# Altium footprint library Amin-Library.PcbLib: 601 footprints (part 17 of 38)
Each footprint in its own frame and in the unit in brackets; x right, y up, seen from the top. Pads: shape width x height; smd on the part's side, far side on the other; paste and mask are expansions set on the pad; w line width, h text height; cw(c..) or ccw(c..) is an arc to the next point about the centre after c.
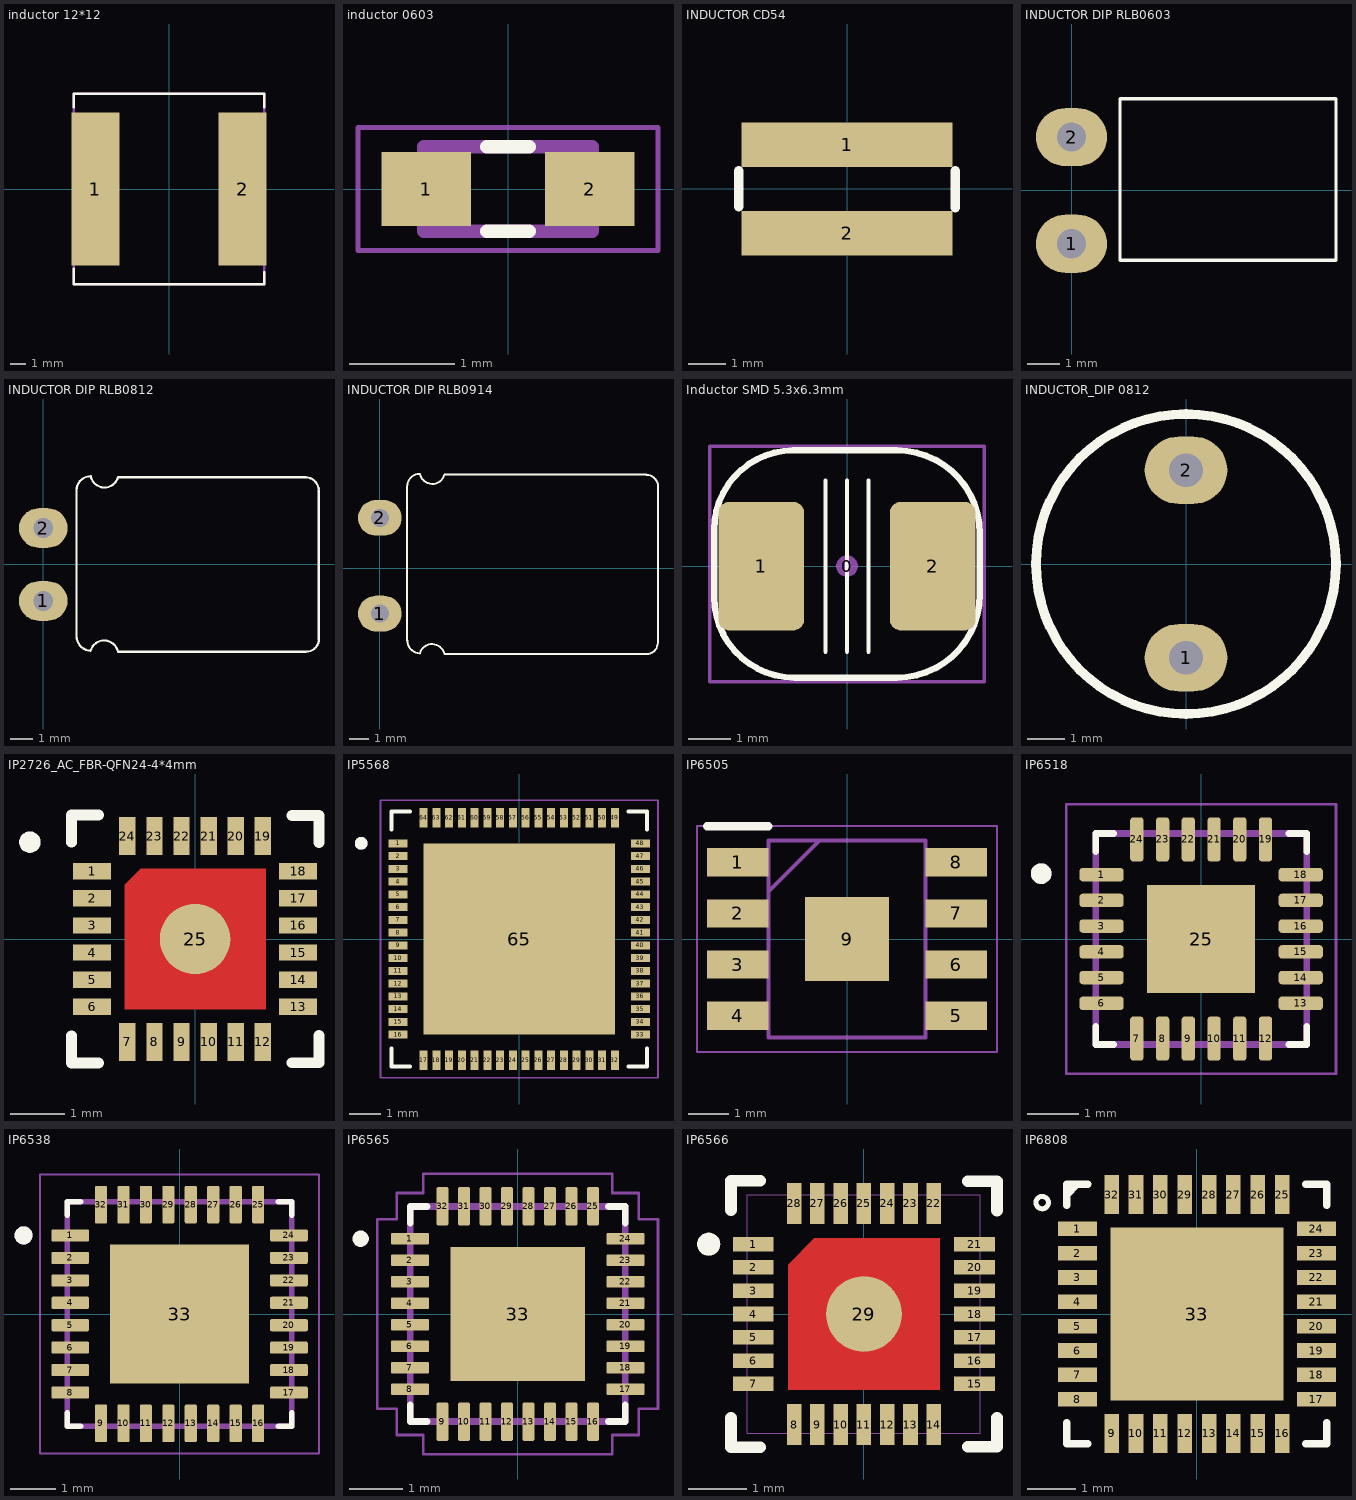
[diagram p16: the footprints below, top view; thin cyan lines are the x and y axes]

## inductor 12*12 [mil]
height 393.7
pads (2):
  rect 124x393.7 smd paste-99999: 1(-190,0) 2(190,0)
Top Overlay:
  lines w6: -246,-205 -246,-246 246,-246 246,-215 ; -246,210 -246,246 246,246 246,210
Top Paste:
  rectangle: 140,150 240,175
  rectangle: 140,109.38 240,134.38
  rectangle: 140,68.75 240,93.75
  rectangle: 140,28.12 240,53.12
  rectangle: 140,-12.5 240,12.5
  rectangle: 140,-53.12 240,-28.12
  rectangle: 140,-93.75 240,-68.75
  rectangle: 140,-134.38 240,-109.38
  rectangle: 140,-175 240,-150
  rectangle: -240,150 -140,175
  rectangle: -240,109.38 -140,134.38
  rectangle: -240,68.75 -140,93.75
  rectangle: -240,28.12 -140,53.12
  rectangle: -240,-12.5 -140,12.5
  rectangle: -240,-53.12 -140,-28.12
  rectangle: -240,-93.75 -140,-68.75
  rectangle: -240,-134.38 -140,-109.38
  rectangle: -240,-175 -140,-150
Mechanical 4:
  lines w6: -246,-246 246,-246 ; -246,-246 -246,246 ; -246,-246 246,-246 ; -246,-246 -246,246 ; -246,246 246,246 ; -246,246 246,246 ; 246,-246 246,246 ; 246,-246 246,246
3D body "User Library-CDRH127-2.step": height 315.46, standoff 0.5, extent -236.22,-236.22 236.22,236.22

## inductor 0603 [mm]
pads (2):
  rect 0.85x0.7 smd: 1(-0.775,0) 2(0.775,0)
Top Overlay:
  lines w0.127: -0.2,-0.4 0.2,-0.4 ; -0.2,0.4 0.2,0.4
Mechanical 4:
  region: -0.8,0.4 -0.4,0.4 -0.4,-0.4 -0.8,-0.4
  region: 0.4,0.4 0.8,0.4 0.8,-0.4 0.4,-0.4
  region: -0.8,0.4 -0.4,0.4 -0.4,-0.4 -0.8,-0.4
  region: 0.4,0.4 0.8,0.4 0.8,-0.4 0.4,-0.4
  lines w0.127: -0.8,-0.4 0.8,-0.4 ; -0.8,-0.4 -0.8,0.4 ; -0.8,-0.4 0.8,-0.4 ; -0.8,-0.4 -0.8,0.4 ; -0.8,0.4 0.8,0.4 ; -0.8,0.4 0.8,0.4 ; 0.8,-0.4 0.8,0.4 ; 0.8,-0.4 0.8,0.4
Mechanical 16:
  lines w0.051: -1.423,-0.583 1.423,-0.583 1.423,0.583 -1.423,0.583 -1.423,-0.583
3D body "User Library-FB_1608.STEP": height 0.8, standoff 0, extent -0.8,-0.4 0.8,0.4

## INDUCTOR CD54 [mm]
pads (2):
  rect 5.7x1.2 smd: 1(0,1.194) 2(0,-1.206)
Top Overlay:
  lines w0.254: -2.921,-0.483 -2.921,0.483 ; 2.921,-0.508 2.921,0.483

## INDUCTOR DIP RLB0603 [mm] "INDUCTOR DIP  RLB0603"
pads (2):
  oval 2.2x1.8 hole 0.9: 1(0,-1.651) 2(0,1.651)
Top Overlay:
  lines w0.1: 1.5,-2.159 8.189,-2.159 8.189,2.841 1.5,2.841 1.5,-2.159
3D body "RLB0608_horizontal.stp": height 5.1, standoff -3, extent -0.061,-2.159 8.189,2.841

## INDUCTOR DIP RLB0812 [mm] "INDUCTOR DIP  12*8 RLB0812"
pads (2):
  oval 2.2x1.8 hole 0.9: 1(0,-1.651) 2(0,1.651)
Top Overlay:
  lines w0.1: 1.498,3.36 cw(c2.145,3.347) 2.145,3.995 ccw(c2.768,4.119) 3.38,3.95 11.888,3.95 ; 1.5,-3.256 1.5,3.36 ; 1.505,-3.255 ccw(c2.153,-3.255) 2.14,-3.902 ; 2.142,-3.905 cw(c2.754,-4.075) 3.377,-3.95 11.896,-3.95 ccw(c11.896,-3.367) 12.479,-3.378 ; 11.884,3.944 cw(c11.872,3.344) 12.472,3.344 ; 12.472,-3.384 12.472,3.352
3D body "RLB0812_horizontal.stp": height 6.8, standoff -3, extent -0.337,-3.223 11.938,3.477

## INDUCTOR DIP RLB0914 [mm] "INDUCTOR DIP RLB0914"
pads (2):
  oval 2.2x1.8 hole 0.9: 1(0,-2.286) 2(0,2.54)
Top Overlay:
  lines w0.1: 1.371,-3.638 1.371,4.122 cw(c2.018,4.109) 2.018,4.757 ccw(c2.641,4.881) 3.253,4.712 13.428,4.712 ; 1.384,-3.638 ccw(c2.031,-3.638) 2.018,-4.286 cw(c2.63,-4.455) 3.253,-4.33 13.428,-4.331 ccw(c13.428,-3.748) 14.012,-3.753 ; 13.428,4.709 cw(c13.417,4.109) 14.017,4.109 14.017,-3.753
3D body "RLB0914_horizontal.stp": height 8.8, standoff -3, extent -0.407,-4.191 13.869,4.509

## Inductor SMD 5.3x6.3mm [mm] "Inductor 4.7µH SMD 5.3*6.3mm"
height 2.54
pads (3):
  round 0.508 on Mech15: 0(0,0)
  rrect25% 2x3 smd: 1(-2,0) 2(2,0)
Top Overlay:
  lines w0.1: -0.5,-2 -0.5,2 ; 0,-2 0,2 ; 0.5,-2 0.5,2
  lines w0.15: -3.1,-0.725 ccw(c-1.225,-0.725) -1.225,-2.6 1.165,-2.6 ccw(c1.165,-0.665) 3.1,-0.665 3.1,0.765 ccw(c1.165,0.765) 1.165,2.7 -1.252,2.7 ccw(c-1.252,0.852) -3.1,0.852 -3.1,-0.725
Mechanical 15:
  lines w0.076: -3.2,-2.7 -3.2,2.8 3.2,2.8 3.2,-2.7 -3.2,-2.7
3D body "smd self 4.7uH.stp": height 4.5, standoff 0, extent -2.899,-2.6 2.889,2.6

## INDUCTOR_DIP 0812 [mm] "INDUCTOR DIP  8*12"
pads (2):
  oval 2.2x1.8 hole 0.9: 1(0,-2.5) 2(0,2.5)
Top Overlay:
  circle w0.254: c0,0 r4
3D body "Inductor.STEP": height 13.5, standoff -4, extent -4.988,-5 4.988,5

## IP2726_AC_FBR-QFN24-4*4mm [mm]
pads (26):
  rect 0.7x0.3 smd mask+0.03: 1(-1.9,1.25) 2(-1.9,0.75) 3(-1.9,0.25) 4(-1.9,-0.25) 5(-1.9,-0.75) 6(-1.9,-1.25) 13(1.9,-1.25) 14(1.9,-0.75) 15(1.9,-0.25) 16(1.9,0.25) 17(1.9,0.75) 18(1.9,1.25)
  rect 0.3x0.7 smd mask+0.03: 7(-1.25,-1.9) 8(-0.75,-1.9) 9(-0.25,-1.9) 10(0.25,-1.9) 11(0.75,-1.9) 12(1.25,-1.9) 19(1.25,1.9) 20(0.75,1.9) 21(0.25,1.9) 22(-0.25,1.9) 23(-0.75,1.9) 24(-1.25,1.9)
  round 1.3 smd paste-2: 25(0,0)
  round 0.4 on Top Overlay: ""(-3.048,1.786)
Top Layer:
  region: -1,1.3 -1.3,1 -1.3,-1.3 1.3,-1.3 1.3,1.3
Top Overlay:
  lines w0.2: -2.282,-1.786 -2.282,-2.286 -1.782,-2.286 ; -2.282,1.786 -2.282,2.286 -1.782,2.286 ; 1.786,-2.282 2.286,-2.282 2.286,-1.782 ; 1.786,2.278 2.286,2.278 2.286,1.778
Top Paste:
  rectangle: 0.225,-0.95 0.975,-0.25
  rectangle: 0.225,0.225 0.975,0.975
  rectangle: -0.975,0.25 -0.225,0.95
  rectangle: -0.975,-0.95 -0.225,-0.25
3D body: height 0.75, standoff 0, extent -2,-2.05 2,2.05

## IP5568 [mm]
pads (65):
  rect 0.6x0.25 smd: 1(-3.8,3) 2(-3.8,2.6) 3(-3.8,2.2) 4(-3.8,1.8) 5(-3.8,1.4) 6(-3.8,1) 7(-3.8,0.6) 8(-3.8,0.2) 9(-3.8,-0.2) 10(-3.8,-0.6) 11(-3.8,-1) 12(-3.8,-1.4) 13(-3.8,-1.8) 14(-3.8,-2.2) 15(-3.8,-2.6) 16(-3.8,-3) 33(3.8,-3) 34(3.8,-2.6) 35(3.8,-2.2) 36(3.8,-1.8) 37(3.8,-1.4) 38(3.8,-1) 39(3.8,-0.6) 40(3.8,-0.2) 41(3.8,0.2) 42(3.8,0.6) 43(3.8,1) 44(3.8,1.4) 45(3.8,1.8) 46(3.8,2.2) 47(3.8,2.6) 48(3.8,3)
  rect 0.25x0.6 smd: 17(-3,-3.8) 18(-2.6,-3.8) 19(-2.2,-3.8) 20(-1.8,-3.8) 21(-1.4,-3.8) 22(-1,-3.8) 23(-0.6,-3.8) 24(-0.2,-3.8) 25(0.2,-3.8) 26(0.6,-3.8) 27(1,-3.8) 28(1.4,-3.8) 29(1.8,-3.8) 30(2.2,-3.8) 31(2.6,-3.8) 32(3,-3.8) 49(3,3.8) 50(2.6,3.8) 51(2.2,3.8) 52(1.8,3.8) 53(1.4,3.8) 54(1,3.8) 55(0.6,3.8) 56(0.2,3.8) 57(-0.2,3.8) 58(-0.6,3.8) 59(-1,3.8) 60(-1.4,3.8) 61(-1.8,3.8) 62(-2.2,3.8) 63(-2.6,3.8) 64(-3,3.8)
  rect 6x6 smd paste-2.535: 65(0,0)
Top Overlay:
  circle w0.2: c-4.955,3 r0.1
  lines w0.127: -4,-3.43 -4,-4 -3.43,-4 ; -4,3.43 -4,4 -3.43,4 ; 3.43,-4 4,-4 4,-3.43 ; 3.43,4 4,4 4,3.43
Top Paste:
  region: 0.465,0.665 -0.465,0.665 -0.465,1.595 0.465,1.595
  region: 0.465,1.795 -0.465,1.795 -0.465,2.725 0.465,2.725
  region: -0.665,1.795 -1.595,1.795 -1.595,2.725 -0.665,2.725
  region: -1.795,1.795 -2.725,1.795 -2.725,2.725 -1.795,2.725
  region: 1.595,1.795 0.665,1.795 0.665,2.725 1.595,2.725
  region: 2.725,1.795 1.795,1.795 1.795,2.725 2.725,2.725
  region: 2.725,0.665 1.795,0.665 1.795,1.595 2.725,1.595
  region: 1.595,0.665 0.665,0.665 0.665,1.595 1.595,1.595
  region: -0.665,0.665 -1.595,0.665 -1.595,1.595 -0.665,1.595
  region: -1.795,0.665 -2.725,0.665 -2.725,1.595 -1.795,1.595
  region: -1.795,-0.465 -2.725,-0.465 -2.725,0.465 -1.795,0.465
  region: -0.665,-0.465 -1.595,-0.465 -1.595,0.465 -0.665,0.465
  region: 1.595,-0.465 0.665,-0.465 0.665,0.465 1.595,0.465
  region: 2.725,-0.465 1.795,-0.465 1.795,0.465 2.725,0.465
  region: 0.465,-2.725 -0.465,-2.725 -0.465,-1.795 0.465,-1.795
  region: 0.465,-1.595 -0.465,-1.595 -0.465,-0.665 0.465,-0.665
  region: -0.665,-1.595 -1.595,-1.595 -1.595,-0.665 -0.665,-0.665
  region: -1.795,-1.595 -2.725,-1.595 -2.725,-0.665 -1.795,-0.665
  region: 1.595,-1.595 0.665,-1.595 0.665,-0.665 1.595,-0.665
  region: 2.725,-1.595 1.795,-1.595 1.795,-0.665 2.725,-0.665
  region: 2.725,-2.725 1.795,-2.725 1.795,-1.795 2.725,-1.795
  region: 1.595,-2.725 0.665,-2.725 0.665,-1.795 1.595,-1.795
  region: -0.665,-2.725 -1.595,-2.725 -1.595,-1.795 -0.665,-1.795
  region: -1.795,-2.725 -2.725,-2.725 -2.725,-1.795 -1.795,-1.795
Top Courtyard:
  lines w0.05: -4.35,-4.35 4.35,-4.35 4.35,4.35 -4.35,4.35 -4.35,-4.35
Mechanical 13:
  circle w0.2: c-4.955,3 r0.1
Mechanical 15:
  lines w0.05: -4.35,-4.35 4.35,-4.35 4.35,4.35 -4.35,4.35 -4.35,-4.35
3D body "step_temp.STEP": height 0.9, standoff 0, extent -4,-4 4,4

## IP6505 [mm]
pads (9):
  rect 1.525x0.7 smd: 1(-2.712,1.905) 2(-2.712,0.635) 3(-2.712,-0.635) 4(-2.712,-1.905) 5(2.712,-1.905) 6(2.712,-0.635) 7(2.712,0.635) 8(2.712,1.905)
  rect 2.09x2.09 smd: 9(0,0)
Top Overlay:
  lines w0.2: -3.475,2.8 -1.95,2.8
Mechanical 3:
  lines w0.05: -3.725,-2.8 3.725,-2.8 3.725,2.8 -3.725,2.8 -3.725,-2.8
  lines w0.1: -1.95,1.18 -0.68,2.45 ; -1.95,-2.45 1.95,-2.45 1.95,2.45 -1.95,2.45 -1.95,-2.45
3D body "IP6505.stp": height 1.65, standoff 0, extent -3,-2.45 3,2.45

## IP6518 [mm] "DC DC 45W FAST CHAREGR TYPE C"
pads (25):
  rrect50% 0.86x0.26 smd: 1(-1.935,1.25) 2(-1.935,0.75) 3(-1.935,0.25) 4(-1.935,-0.25) 5(-1.935,-0.75) 6(-1.935,-1.25) 13(1.935,-1.25) 14(1.935,-0.75) 15(1.935,-0.25) 16(1.935,0.25) 17(1.935,0.75) 18(1.935,1.25)
  rrect50% 0.26x0.86 smd: 7(-1.25,-1.935) 8(-0.75,-1.935) 9(-0.25,-1.935) 10(0.25,-1.935) 11(0.75,-1.935) 12(1.25,-1.935) 19(1.25,1.935) 20(0.75,1.935) 21(0.25,1.935) 22(-0.25,1.935) 23(-0.75,1.935) 24(-1.25,1.935)
  rect 2.1x2.1 smd paste-2: 25(0,0)
Top Overlay:
  circle w0.2: c-3.11,1.27 r0.1
  lines w0.127: -2.05,-1.7 -2.05,-2.05 -1.7,-2.05 ; -2.05,1.7 -2.05,2.05 -1.7,2.05 ; 1.7,-2.05 2.05,-2.05 2.05,-1.7 ; 1.7,2.05 2.05,2.05 2.05,1.7
Top Paste:
  region: -0.13,0.13 -0.79,0.13 -0.79,0.79 -0.13,0.79
  region: 0.79,0.13 0.13,0.13 0.13,0.79 0.79,0.79
  region: -0.13,-0.79 -0.79,-0.79 -0.79,-0.13 -0.13,-0.13
  region: 0.79,-0.79 0.13,-0.79 0.13,-0.13 0.79,-0.13
Mechanical 13:
  circle w0.2: c-3.11,1.27 r0.1
  lines w0.127: -2.05,-2.05 -2.05,2.05 2.05,2.05 2.05,-2.05 -2.05,-2.05
Mechanical 15:
  lines w0.05: -2.62,-2.62 -2.62,2.62 2.62,2.62 2.62,-2.62 -2.62,-2.62
3D body "User Library-QFN 24 4x4.step": height 0.91, standoff 0.01, extent -2.002,-2.002 2.002,2.002

## IP6538 [mm] "15w Wirless charger ic"
pads (33):
  rrect25% 0.84x0.27 smd mask-2539.97: 1(-2.435,1.75) 2(-2.435,1.25) 3(-2.435,0.75) 4(-2.435,0.25) 5(-2.435,-0.25) 6(-2.435,-0.75) 7(-2.435,-1.25) 8(-2.435,-1.75) 17(2.435,-1.75) 18(2.435,-1.25) 19(2.435,-0.75) 20(2.435,-0.25) 21(2.435,0.25) 22(2.435,0.75) 23(2.435,1.25) 24(2.435,1.75)
  rrect25% 0.27x0.84 smd mask-2539.97: 9(-1.75,-2.435) 10(-1.25,-2.435) 11(-0.75,-2.435) 12(-0.25,-2.435) 13(0.25,-2.435) 14(0.75,-2.435) 15(1.25,-2.435) 16(1.75,-2.435) 25(1.75,2.435) 26(1.25,2.435) 27(0.75,2.435) 28(0.25,2.435) 29(-0.25,2.435) 30(-0.75,2.435) 31(-1.25,2.435) 32(-1.75,2.435)
  rect 3.1x3.1 smd paste-3: 33(0,0)
Top Overlay:
  circle w0.2: c-3.475,1.75 r0.1
  lines w0.127: -2.5,-2.205 -2.5,-2.5 -2.205,-2.5 ; -2.5,2.205 -2.5,2.5 -2.205,2.5 ; 2.205,-2.5 2.5,-2.5 2.5,-2.205 ; 2.205,2.5 2.5,2.5 2.5,2.205
Top Paste:
  region: 1.24,-1.25 0.25,-1.25 0.25,-0.27 1.24,-0.27
  region: -0.26,-1.25 -1.25,-1.25 -1.25,-0.27 -0.26,-0.27
  region: -0.26,0.26 -1.25,0.26 -1.25,1.24 -0.26,1.24
  region: 1.24,0.26 0.25,0.26 0.25,1.24 1.24,1.24
Top Solder:
  region: 1.985,1.55 1.985,1.95 2.885,1.95 2.885,1.55
  region: 1.985,1.05 1.985,1.45 2.885,1.45 2.885,1.05
  region: 1.985,0.55 1.985,0.95 2.885,0.95 2.885,0.55
  region: 1.985,0.05 1.985,0.45 2.885,0.45 2.885,0.05
  region: 1.985,-0.45 1.985,-0.05 2.885,-0.05 2.885,-0.45
  region: 1.985,-0.95 1.985,-0.55 2.885,-0.55 2.885,-0.95
  region: 1.985,-1.45 1.985,-1.05 2.885,-1.05 2.885,-1.45
  region: 1.985,-1.95 1.985,-1.55 2.885,-1.55 2.885,-1.95
  region: -2.885,-1.95 -2.885,-1.55 -1.985,-1.55 -1.985,-1.95
  region: -2.885,-1.45 -2.885,-1.05 -1.985,-1.05 -1.985,-1.45
  region: -2.885,-0.95 -2.885,-0.55 -1.985,-0.55 -1.985,-0.95
  region: -2.885,-0.45 -2.885,-0.05 -1.985,-0.05 -1.985,-0.45
  region: -2.885,0.05 -2.885,0.45 -1.985,0.45 -1.985,0.05
  region: -2.885,0.55 -2.885,0.95 -1.985,0.95 -1.985,0.55
  region: -2.885,1.05 -2.885,1.45 -1.985,1.45 -1.985,1.05
  region: -2.885,1.55 -2.885,1.95 -1.985,1.95 -1.985,1.55
  region: -1.95,1.985 -1.95,2.885 -1.55,2.885 -1.55,1.985
  region: -1.45,1.985 -1.45,2.885 -1.05,2.885 -1.05,1.985
  region: -0.95,1.985 -0.95,2.885 -0.55,2.885 -0.55,1.985
  region: -0.45,1.985 -0.45,2.885 -0.05,2.885 -0.05,1.985
  region: 0.05,1.985 0.05,2.885 0.45,2.885 0.45,1.985
  region: 0.55,1.985 0.55,2.885 0.95,2.885 0.95,1.985
  region: 1.05,1.985 1.05,2.885 1.45,2.885 1.45,1.985
  region: 1.55,1.985 1.55,2.885 1.95,2.885 1.95,1.985
  region: 1.55,-2.885 1.55,-1.985 1.95,-1.985 1.95,-2.885
  region: 1.05,-2.885 1.05,-1.985 1.45,-1.985 1.45,-2.885
  region: 0.55,-2.885 0.55,-1.985 0.95,-1.985 0.95,-2.885
  region: 0.05,-2.885 0.05,-1.985 0.45,-1.985 0.45,-2.885
  region: -0.45,-2.885 -0.45,-1.985 -0.05,-1.985 -0.05,-2.885
  region: -0.95,-2.885 -0.95,-1.985 -0.55,-1.985 -0.55,-2.885
  region: -1.45,-2.885 -1.45,-1.985 -1.05,-1.985 -1.05,-2.885
  region: -1.95,-2.885 -1.95,-1.985 -1.55,-1.985 -1.55,-2.885
Top Courtyard:
  lines w0.1: 2.5,-2.509 2.5,2.5 2.49,2.51 -2.49,2.51 -2.5,2.5 -2.5,-2.5 -2.49,-2.51 2.5,-2.51 ; 2.5,-2.509 2.5,-2.51
Mechanical 13:
  circle w0.2: c-3.475,1.75 r0.1
  lines w0.127: -2.5,-2.5 -2.5,2.5 2.5,2.5 2.5,-2.5 -2.5,-2.5
Mechanical 15:
  lines w0.05: -3.105,-3.105 -3.105,3.105 3.105,3.105 3.105,-3.105 -3.105,-3.105
3D body "User Library-qfn32-5x5.step": height 0.8, standoff 0, extent -2.52,-2.51 2.5,2.51

## IP6565 [mm] "QFN32 4*4"
height 4.32
pads (33):
  rrect25% 0.71x0.22 smd mask-2539.97: 1(-2.005,1.4) 2(-2.005,1) 3(-2.005,0.6) 4(-2.005,0.2) 5(-2.005,-0.2) 6(-2.005,-0.6) 7(-2.005,-1) 8(-2.005,-1.4) 17(2.005,-1.4) 18(2.005,-1) 19(2.005,-0.6) 20(2.005,-0.2) 21(2.005,0.2) 22(2.005,0.6) 23(2.005,1) 24(2.005,1.4)
  rrect25% 0.22x0.71 smd mask-2539.97: 9(-1.4,-2.005) 10(-1,-2.005) 11(-0.6,-2.005) 12(-0.2,-2.005) 13(0.2,-2.005) 14(0.6,-2.005) 15(1,-2.005) 16(1.4,-2.005) 25(1.4,2.005) 26(1,2.005) 27(0.6,2.005) 28(0.2,2.005) 29(-0.2,2.005) 30(-0.6,2.005) 31(-1,2.005) 32(-1.4,2.005)
  rect 2.5x2.5 smd paste-2: 33(0,0)
Top Overlay:
  circle w0.2: c-2.921,1.4 r0.05
  lines w0.127: -2,-1.69 -2,-2 -1.69,-2 ; -2,1.69 -2,2 -1.69,2 ; 1.69,-2 2,-2 2,-1.69 ; 1.69,2 2,2 2,1.69
Top Paste:
  rectangle: 0.7,0.7 1.1,1.1
  rectangle: 0.1,0.7 0.5,1.1
  rectangle: -0.5,0.7 -0.1,1.1
  rectangle: -1.1,0.7 -0.7,1.1
  rectangle: 0.7,0.1 1.1,0.5
  rectangle: 0.1,0.1 0.5,0.5
  rectangle: -0.5,0.1 -0.1,0.5
  rectangle: -1.1,0.1 -0.7,0.5
  rectangle: 0.7,-0.5 1.1,-0.1
  rectangle: 0.1,-0.5 0.5,-0.1
  rectangle: -0.5,-0.5 -0.1,-0.1
  rectangle: -1.1,-0.5 -0.7,-0.1
  rectangle: 0.7,-1.1 1.1,-0.7
  rectangle: 0.1,-1.1 0.5,-0.7
  rectangle: -0.5,-1.1 -0.1,-0.7
  rectangle: -1.1,-1.1 -0.7,-0.7
Top Solder:
  region: 1.25,1.605 1.25,2.405 1.55,2.405 1.55,1.605
  region: 0.85,1.605 0.85,2.405 1.15,2.405 1.15,1.605
  region: 0.45,1.605 0.45,2.405 0.75,2.405 0.75,1.605
  region: 0.05,1.605 0.05,2.405 0.35,2.405 0.35,1.605
  region: -0.35,1.605 -0.35,2.405 -0.05,2.405 -0.05,1.605
  region: -0.75,1.605 -0.75,2.405 -0.45,2.405 -0.45,1.605
  region: -1.15,1.605 -1.15,2.405 -0.85,2.405 -0.85,1.605
  region: -1.55,1.605 -1.55,2.405 -1.25,2.405 -1.25,1.605
  region: -2.405,1.25 -2.405,1.55 -1.605,1.55 -1.605,1.25
  region: -2.405,0.85 -2.405,1.15 -1.605,1.15 -1.605,0.85
  region: -2.405,0.45 -2.405,0.75 -1.605,0.75 -1.605,0.45
  region: -2.405,0.05 -2.405,0.35 -1.605,0.35 -1.605,0.05
  region: -2.405,-0.35 -2.405,-0.05 -1.605,-0.05 -1.605,-0.35
  region: -2.405,-0.75 -2.405,-0.45 -1.605,-0.45 -1.605,-0.75
  region: -2.405,-1.15 -2.405,-0.85 -1.605,-0.85 -1.605,-1.15
  region: -2.405,-1.55 -2.405,-1.25 -1.605,-1.25 -1.605,-1.55
  region: -1.55,-2.405 -1.55,-1.605 -1.25,-1.605 -1.25,-2.405
  region: -1.15,-2.405 -1.15,-1.605 -0.85,-1.605 -0.85,-2.405
  region: -0.75,-2.405 -0.75,-1.605 -0.45,-1.605 -0.45,-2.405
  region: -0.35,-2.405 -0.35,-1.605 -0.05,-1.605 -0.05,-2.405
  region: 0.05,-2.405 0.05,-1.605 0.35,-1.605 0.35,-2.405
  region: 0.45,-2.405 0.45,-1.605 0.75,-1.605 0.75,-2.405
  region: 0.85,-2.405 0.85,-1.605 1.15,-1.605 1.15,-2.405
  region: 1.25,-2.405 1.25,-1.605 1.55,-1.605 1.55,-2.405
  region: 1.605,-1.15 1.605,-0.85 2.405,-0.85 2.405,-1.15
  region: 1.605,-1.55 1.605,-1.25 2.405,-1.25 2.405,-1.55
  region: 1.605,-0.75 1.605,-0.45 2.405,-0.45 2.405,-0.75
  region: 1.605,-0.35 1.605,-0.05 2.405,-0.05 2.405,-0.35
  region: 1.605,0.05 1.605,0.35 2.405,0.35 2.405,0.05
  region: 1.605,0.45 1.605,0.75 2.405,0.75 2.405,0.45
  region: 1.605,0.85 1.605,1.15 2.405,1.15 2.405,0.85
  region: 1.605,1.25 1.605,1.55 2.405,1.55 2.405,1.25
Top Courtyard:
  lines w0.02: -2,-2 2,-2 2,2 -2,2 -2,-2
Mechanical 13:
  lines w0.127: -2,-2 -2,2 2,2 2,-2 -2,-2
Mechanical 15:
  lines w0.05: -2.61,-1.76 -2.61,1.76 -2.25,1.76 -2.25,2.25 -1.76,2.25 -1.76,2.61 1.76,2.61 1.76,2.25 2.25,2.25 2.25,1.76 2.61,1.76 2.61,-1.76 2.25,-1.76 2.25,-2.25 1.76,-2.25 1.76,-2.61 -1.76,-2.61 -1.76,-2.25 -2.25,-2.25 -2.25,-1.76 -2.61,-1.76
3D body "step_temp.STEP": height 0.55, standoff 0, extent -2,-2 2,2

## IP6566 [mm]
height 4.32
pads (30):
  rect 0.7x0.25 smd mask+0.03: 1(-1.9,1.2) 2(-1.9,0.8) 3(-1.9,0.4) 4(-1.9,0) 5(-1.9,-0.4) 6(-1.9,-0.8) 7(-1.9,-1.2) 15(1.9,-1.2) 16(1.9,-0.8) 17(1.9,-0.4) 18(1.9,0) 19(1.9,0.4) 20(1.9,0.8) 21(1.9,1.2)
  rect 0.25x0.7 smd mask+0.03: 8(-1.2,-1.9) 9(-0.8,-1.9) 10(-0.4,-1.9) 11(0,-1.9) 12(0.4,-1.9) 13(0.8,-1.9) 14(1.2,-1.9) 22(1.2,1.9) 23(0.8,1.9) 24(0.4,1.9) 25(0,1.9) 26(-0.4,1.9) 27(-0.8,1.9) 28(-1.2,1.9)
  round 1.3 smd paste-2: 29(0,0)
  round 0.4 on Top Overlay: ""(-2.667,1.2)
Top Layer:
  region: -0.85,1.3 -1.3,0.85 -1.3,-1.3 1.3,-1.3 1.3,1.3
Top Overlay:
  lines w0.2: -2.282,-1.786 -2.282,-2.286 -1.782,-2.286 ; -2.282,1.786 -2.282,2.286 -1.782,2.286 ; 1.786,-2.282 2.286,-2.282 2.286,-1.782 ; 1.786,2.278 2.286,2.278 2.286,1.778
Top Paste:
  rectangle: 0.225,-0.951 0.975,-0.251
  rectangle: 0.224,0.224 0.974,0.974
  rectangle: -0.975,0.25 -0.225,0.95
  rectangle: -0.976,-0.949 -0.226,-0.249
Top Courtyard:
  lines w0.02: -2,-2.05 -2,2.05 ; -2,-2.05 -2,-2.05 ; -2,-2.05 2,-2.05 2,2.05 -2,2.05 ; -2,2.05 -2,2.05
3D body: height 0.75, standoff 0, extent -2,-2.05 2,2.05

## IP6808 [mm] "Wireless Power Transmitter  7.5W/10W   QFN32 5mm*5mm 0.5 pitch"
pads (33):
  rect 0.805x0.3 smd: 1(-2.452,1.75) 2(-2.452,1.25) 3(-2.452,0.75) 4(-2.452,0.25) 5(-2.452,-0.25) 6(-2.452,-0.75) 7(-2.452,-1.25) 8(-2.452,-1.75) 17(2.452,-1.75) 18(2.452,-1.25) 19(2.452,-0.75) 20(2.452,-0.25) 21(2.452,0.25) 22(2.452,0.75) 23(2.452,1.25) 24(2.452,1.75)
  rect 0.3x0.805 smd: 9(-1.75,-2.452) 10(-1.25,-2.452) 11(-0.75,-2.452) 12(-0.25,-2.452) 13(0.25,-2.452) 14(0.75,-2.452) 15(1.25,-2.452) 16(1.75,-2.452) 25(1.75,2.452) 26(1.25,2.452) 27(0.75,2.452) 28(0.25,2.452) 29(-0.25,2.452) 30(-0.75,2.452) 31(-1.25,2.452) 32(-1.75,2.452)
  rect 3.55x3.55 smd paste-3: 33(0,0)
Top Overlay:
  circle w0.102: c-3.175,2.286 r0.127
  lines w0.152: -2.667,-2.235 -2.667,-2.667 -2.235,-2.667 ; -2.667,2.235 -2.667,2.667 -2.235,2.667 ; -2.667,2.451 -2.451,2.667 ; 2.235,-2.667 2.667,-2.667 2.667,-2.235 ; 2.235,2.667 2.667,2.667 2.667,2.235
Top Paste:
  region: -0.1,0.1 -1.675,0.1 -1.675,1.675 -0.1,1.675
  region: -0.1,-1.675 -1.675,-1.675 -1.675,-0.1 -0.1,-0.1
  region: 1.675,0.1 0.1,0.1 0.1,1.675 1.675,1.675
  region: 1.675,-1.675 0.1,-1.675 0.1,-0.1 1.675,-0.1
3D body "User Library-qfn32-5x5.step": height 0.8, standoff 0, extent -2.51,-2.51 2.51,2.51